# Altium schematic symbol library HMC349AMS8GE.SchLib: 1 symbol
Pins are listed as number, name and electrical type; pins without a type are passive.

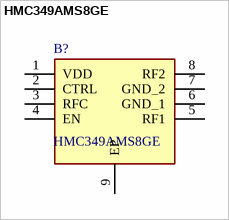
[diagram p0: symbol HMC349AMS8GE]

## HMC349AMS8GE
designator B?
High Isolation, Nonreflective, GaAs, SPDT Switch,100 MHz to 4 GHz; Manufacturer_Name: Analog Devices; Geometry.Height: 1.1mm; Mouser Part Number: 584-HMC349AMS8GE; Mouser Price/Stock: https://www.mouser.co.uk/ProductDetail/Analog-Devices/HMC349AMS8GE?qs=pceeu5JH%2FH9BjxXZlXR05g%3D%3D; Manufacturer_Part_Number: HMC349AMS8GE; Datasheet Link: https://www.analog.com/HMC349AMS8G/datasheet
footprint SOP65P490X110-9N
pins: 1 VDD, 2 CTRL, 3 RFC, 4 EN, 5 RF1, 6 GND_1, 7 GND_2, 8 RF2, 9 EP